# Altium footprint library SOP.PcbLib: 8 footprints
Each footprint in its own frame and in the unit in brackets; x right, y up, seen from the top. Pads: shape width x height; smd on the part's side, far side on the other; paste and mask are expansions set on the pad; w line width, h text height; cw(c..) or ccw(c..) is an arc to the next point about the centre after c.
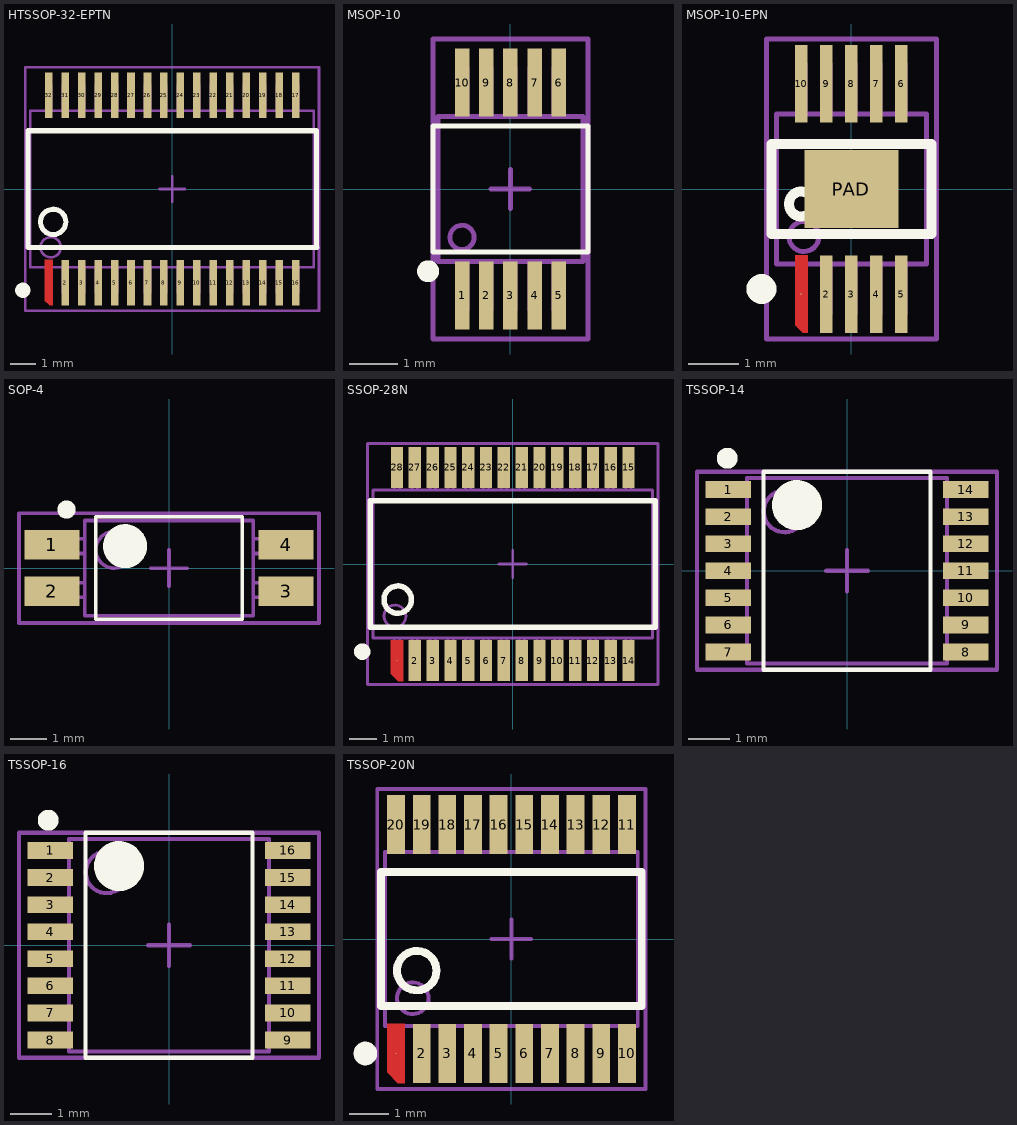
[diagram p0: the footprints below, top view; thin cyan lines are the x and y axes]

## HTSSOP-32-EPTN [mm]
height 1.2
pads (32):
  round 0.025 smd: 1(-4.875,-3.7)
  rect 0.3x1.8 smd: 2(-4.225,-3.7) 3(-3.575,-3.7) 4(-2.925,-3.7) 5(-2.275,-3.7) 6(-1.625,-3.7) 7(-0.975,-3.7) 8(-0.325,-3.7) 9(0.325,-3.7) 10(0.975,-3.7) 11(1.625,-3.7) 12(2.275,-3.7) 13(2.925,-3.7) 14(3.575,-3.7) 15(4.225,-3.7) 16(4.875,-3.7) 17(4.875,3.7) 18(4.225,3.7) 19(3.575,3.7) 20(2.925,3.7) 21(2.275,3.7) 22(1.625,3.7) 23(0.975,3.7) 24(0.325,3.7) 25(-0.325,3.7) 26(-0.975,3.7) 27(-1.625,3.7) 28(-2.275,3.7) 29(-2.925,3.7) 30(-3.575,3.7) 31(-4.225,3.7) 32(-4.875,3.7)
Top Layer:
  region: -5.025,-2.8 -4.725,-2.8 -4.725,-4.6 -4.845,-4.6 -5.025,-4.42
Top Overlay:
  circle w0.3: c-5.9,-4 r0.15
  circle w0.2: c-4.7,-1.3 r0.5
  lines w0.2: -5.7,-2.3 -5.7,2.3 5.7,2.3 5.7,-2.3 ; -5.689,-2.318 5.711,-2.318
Top Package:
  circle w0.1: c-4.8,-2.3 r0.4
  lines w0.1: -4.975,-3.1 -4.975,-4.1 -4.775,-4.1 -4.775,-3.1 ; -4.975,3.1 -4.975,4.1 -4.775,4.1 -4.775,3.1 ; -4.325,-3.1 -4.325,-4.1 -4.125,-4.1 -4.125,-3.1 ; -4.325,3.1 -4.325,4.1 -4.125,4.1 -4.125,3.1 ; -3.675,-3.1 -3.675,-4.1 -3.475,-4.1 -3.475,-3.1 ; -3.675,3.1 -3.675,4.1 -3.475,4.1 -3.475,3.1 ; -3.025,-3.1 -3.025,-4.1 -2.825,-4.1 -2.825,-3.1 ; -3.025,3.1 -3.025,4.1 -2.825,4.1 -2.825,3.1 ; -2.375,-3.1 -2.375,-4.1 -2.175,-4.1 -2.175,-3.1 ; -2.375,3.1 -2.375,4.1 -2.175,4.1 -2.175,3.1 ; -1.725,-3.1 -1.725,-4.1 -1.525,-4.1 -1.525,-3.1 ; -1.725,3.1 -1.725,4.1 -1.525,4.1 -1.525,3.1 ; -1.075,-3.1 -1.075,-4.1 -0.875,-4.1 -0.875,-3.1 ; -1.075,3.1 -1.075,4.1 -0.875,4.1 -0.875,3.1 ; -0.425,-3.1 -0.425,-4.1 -0.225,-4.1 -0.225,-3.1 ; -0.425,3.1 -0.425,4.1 -0.225,4.1 -0.225,3.1 ; 0.225,-3.1 0.225,-4.1 0.425,-4.1 0.425,-3.1 ; 0.225,3.1 0.225,4.1 0.425,4.1 0.425,3.1 ; 0.875,-3.1 0.875,-4.1 1.075,-4.1 1.075,-3.1 ; 0.875,3.1 0.875,4.1 1.075,4.1 1.075,3.1 ; 1.525,-3.1 1.525,-4.1 1.725,-4.1 1.725,-3.1 ; 1.525,3.1 1.525,4.1 1.725,4.1 1.725,3.1 ; 2.175,-3.1 2.175,-4.1 2.375,-4.1 2.375,-3.1 ; 2.175,3.1 2.175,4.1 2.375,4.1 2.375,3.1 ; 2.825,-3.1 2.825,-4.1 3.025,-4.1 3.025,-3.1 ; 2.825,3.1 2.825,4.1 3.025,4.1 3.025,3.1 ; 3.475,-3.1 3.475,-4.1 3.675,-4.1 3.675,-3.1 ; 3.475,3.1 3.475,4.1 3.675,4.1 3.675,3.1 ; 4.125,-3.1 4.125,-4.1 4.325,-4.1 4.325,-3.1 ; 4.125,3.1 4.125,4.1 4.325,4.1 4.325,3.1 ; 4.775,-3.1 4.775,-4.1 4.975,-4.1 4.975,-3.1 ; 4.775,3.1 4.775,4.1 4.975,4.1 4.975,3.1 ; -5.6,-3.1 5.6,-3.1 5.6,3.1 -5.6,3.1 -5.6,-3.1
Top Comment:
  text ".Comment" at -2.128,-0.503 h1.5
Top Designator:
  text ".Designator" at -3.438,-0.481 h2
Top Border:
  lines w0.1: -0.5,0 0.5,0 ; 0,-0.5 0,0.5 ; -5.8,-4.8 -5.8,4.8 5.8,4.8 5.8,-4.8 -5.8,-4.8
3D body "HTSSOP-TP-32N.step": height 1.21, standoff 0, extent -5.55,-4.225 5.55,4.075

## MSOP-10 [mm]
height 1.1
pads (10):
  rect 0.3x1.4 smd: 1(-1,-2.2) 2(-0.5,-2.2) 3(0,-2.2) 4(0.5,-2.2) 5(1,-2.2) 6(1,2.2) 7(0.5,2.2) 8(0,2.2) 9(-0.5,2.2) 10(-1,2.2)
Top Overlay:
  circle w0.254: c-1.7,-1.7 r0.1
  lines w0.1: -1.6,-1.3 1.6,-1.3 1.6,1.3 -1.6,1.3 -1.6,-1.3
Top Package:
  circle w0.1: c-1,-1 r0.25
  lines w0.1: -1.1,-2 -0.9,-2 ; -1.1,-1.5 -1.1,-2.5 -0.9,-2.5 -0.9,-1.5 ; -1.1,1.5 -1.1,2.5 -0.9,2.5 -0.9,1.5 ; -1.1,2 -0.9,2 ; -0.6,-2 -0.4,-2 ; -0.6,-1.5 -0.6,-2.5 -0.4,-2.5 -0.4,-1.5 ; -0.6,1.5 -0.6,2.5 -0.4,2.5 -0.4,1.5 ; -0.6,2 -0.4,2 ; -0.1,-2 0.1,-2 ; -0.1,-1.5 -0.1,-2.5 0.1,-2.5 0.1,-1.5 ; -0.1,1.5 -0.1,2.5 0.1,2.5 0.1,1.5 ; -0.1,2 0.1,2 ; 0.4,-2 0.6,-2 ; 0.4,-1.5 0.4,-2.5 0.6,-2.5 0.6,-1.5 ; 0.4,1.5 0.4,2.5 0.6,2.5 0.6,1.5 ; 0.4,2 0.6,2 ; 0.9,-2 1.1,-2 ; 0.9,-1.5 0.9,-2.5 1.1,-2.5 1.1,-1.5 ; 0.9,1.5 0.9,2.5 1.1,2.5 1.1,1.5 ; 0.9,2 1.1,2 ; -1.5,-1.5 1.5,-1.5 1.5,1.5 -1.5,1.5 -1.5,-1.5
Top Border:
  lines w0.1: -0.4,0 0.4,0 ; 0,-0.4 0,0.4 ; -1.6,-3.1 -1.6,3.1 1.6,3.1 1.6,-3.1 -1.6,-3.1
3D body "MSOP-10.step": height 1.05, standoff 0, extent -1.5,-2.514 1.5,2.514

## MSOP-10-EPN [mm]
height 1.1
pads (11):
  round 0.025 smd: 1(-1,-2.1)
  rect 0.25x1.55 smd: 2(-0.5,-2.1) 3(0,-2.1) 4(0.5,-2.1) 5(1,-2.1) 6(1,2.1) 7(0.5,2.1) 8(0,2.1) 9(-0.5,2.1) 10(-1,2.1)
  rect 1.88x1.57 smd: PAD(0,0)
Top Layer:
  region: -1.125,-1.325 -0.875,-1.325 -0.875,-2.875 -0.975,-2.875 -1.125,-2.725
Top Overlay:
  circle w0.3: c-1.8,-2 r0.15
  circle w0.2: c-1,-0.3 r0.25
  lines w0.2: -1.6,-0.9 -1.6,0.9 1.6,0.9 1.6,-0.9 -1.6,-0.9
Top Package:
  circle w0.1: c-0.95,-0.95 r0.3
  lines w0.1: -1.075,-1.5 -1.075,-2.5 -0.925,-2.5 -0.925,-1.5 ; -1.075,1.5 -1.075,2.5 -0.925,2.5 -0.925,1.5 ; -0.575,-1.5 -0.575,-2.5 -0.425,-2.5 -0.425,-1.5 ; -0.575,1.5 -0.575,2.5 -0.425,2.5 -0.425,1.5 ; -0.075,-1.5 -0.075,-2.5 0.075,-2.5 0.075,-1.5 ; -0.075,1.5 -0.075,2.5 0.075,2.5 0.075,1.5 ; 0.425,-1.5 0.425,-2.5 0.575,-2.5 0.575,-1.5 ; 0.425,1.5 0.425,2.5 0.575,2.5 0.575,1.5 ; 0.925,-1.5 0.925,-2.5 1.075,-2.5 1.075,-1.5 ; 0.925,1.5 0.925,2.5 1.075,2.5 1.075,1.5 ; -1.5,-1.5 -1.5,1.5 1.5,1.5 1.5,-1.5 -1.5,-1.5
Top Comment:
  text ".Comment" at -2.128,-0.474 h1.5
Top Designator:
  text ".Designator" at -3.438,-0.451 h2
Top Border:
  lines w0.1: -0.5,0 0.5,0 ; 0,-0.5 0,0.5 ; -1.7,-3 -1.7,3 1.7,3 1.7,-3 -1.7,-3
3D body "MSOP-10.STEP": height 1.25, standoff 0, extent -1.5,-2.45 1.5,2.45

## SOP-4 [mm]
height 15
pads (4):
  rect 1.5x0.8 smd: 1(-3.2,0.635) 2(-3.2,-0.635) 3(3.2,-0.635) 4(3.2,0.635)
Top Overlay:
  circle w0.25: c-2.8,1.6 r0.125
  circle w0.6: c-1.2,0.6 r0.3
  lines w0.1: -2,-1.4 -2,1.4 2,1.4 2,-1.4 -2,-1.4
Top Package:
  circle w0.1: c-1.5,0.5 r0.5
  lines w0.1: -2.3,-0.8 -3.3,-0.8 -3.3,-0.4 -2.3,-0.4 ; -2.3,0.4 -3.3,0.4 -3.3,0.8 -2.3,0.8 ; 2.3,-0.8 3.3,-0.8 3.3,-0.4 2.3,-0.4 ; 2.3,0.4 3.3,0.4 3.3,0.8 2.3,0.8 ; -2.3,-1.3 2.3,-1.3 2.3,1.3 -2.3,1.3 -2.3,-1.3
Top Comment:
  text ".Comment" at -1.702,-0.391 h1.2
Top Designator:
  text ".Designator" at -2.579,-0.349 h1.5
Top Border:
  lines w0.1: -0.5,0 0.5,0 ; 0,-0.5 0,0.5 ; -4.1,-1.5 4.1,-1.5 4.1,1.5 -4.1,1.5 -4.1,-1.5
3D body "SOP-4.stp": height 2.15, standoff 0.03, extent -3.5,-1.3 3.5,1.3

## SSOP-28N [mm]
height 2
pads (28):
  round 0.025 smd: 1(-4.225,-3.525)
  rect 0.45x1.5 smd: 2(-3.575,-3.525) 3(-2.925,-3.525) 4(-2.275,-3.525) 5(-1.625,-3.525) 6(-0.975,-3.525) 7(-0.325,-3.525) 8(0.325,-3.525) 9(0.975,-3.525) 10(1.625,-3.525) 11(2.275,-3.525) 12(2.925,-3.525) 13(3.575,-3.525) 14(4.225,-3.525) 15(4.225,3.525) 16(3.575,3.525) 17(2.925,3.525) 18(2.275,3.525) 19(1.625,3.525) 20(0.975,3.525) 21(0.325,3.525) 22(-0.325,3.525) 23(-0.975,3.525) 24(-1.625,3.525) 25(-2.275,3.525) 26(-2.925,3.525) 27(-3.575,3.525) 28(-4.225,3.525)
Top Layer:
  region: -4.45,-2.775 -4,-2.775 -4,-4.275 -4.18,-4.275 -4.45,-4.005
Top Overlay:
  circle w0.3: c-5.5,-3.2 r0.15
  circle w0.2: c-4.2,-1.3 r0.5
  lines w0.2: -5.2,-2.3 5.2,-2.3 5.2,2.3 -5.2,2.3 -5.2,-2.3
Top Package:
  circle w0.1: c-4.3,-1.9 r0.4
  lines w0.1: -4.325,-2.7 -4.325,-3.9 -4.125,-3.9 -4.125,-2.7 ; -4.325,2.7 -4.325,3.9 -4.125,3.9 -4.125,2.7 ; -3.675,-2.7 -3.675,-3.9 -3.475,-3.9 -3.475,-2.7 ; -3.675,2.7 -3.675,3.9 -3.475,3.9 -3.475,2.7 ; -3.025,-2.7 -3.025,-3.9 -2.825,-3.9 -2.825,-2.7 ; -3.025,2.7 -3.025,3.9 -2.825,3.9 -2.825,2.7 ; -2.375,-2.7 -2.375,-3.9 -2.175,-3.9 -2.175,-2.7 ; -2.375,2.7 -2.375,3.9 -2.175,3.9 -2.175,2.7 ; -1.725,-2.7 -1.725,-3.9 -1.525,-3.9 -1.525,-2.7 ; -1.725,2.7 -1.725,3.9 -1.525,3.9 -1.525,2.7 ; -1.075,-2.7 -1.075,-3.9 -0.875,-3.9 -0.875,-2.7 ; -0.425,-2.7 -0.425,-3.9 -0.225,-3.9 -0.225,-2.7 ; -0.425,2.7 -0.425,3.9 -0.225,3.9 -0.225,2.7 ; 0.225,-2.7 0.225,-3.9 0.425,-3.9 0.425,-2.7 ; 0.225,2.7 0.225,3.9 0.425,3.9 0.425,2.7 ; 0.875,-2.7 0.875,-3.9 1.075,-3.9 1.075,-2.7 ; 0.875,2.7 0.875,3.9 1.075,3.9 1.075,2.7 ; 1.525,-2.7 1.525,-3.9 1.725,-3.9 1.725,-2.7 ; 1.525,2.7 1.525,3.9 1.725,3.9 1.725,2.7 ; 2.175,-2.7 2.175,-3.9 2.375,-3.9 2.375,-2.7 ; 2.175,2.7 2.175,3.9 2.375,3.9 2.375,2.7 ; 2.825,-2.7 2.825,-3.9 3.025,-3.9 3.025,-2.7 ; 2.825,2.7 2.825,3.9 3.025,3.9 3.025,2.7 ; 3.475,-2.7 3.475,-3.9 3.675,-3.9 3.675,-2.7 ; 3.475,2.7 3.475,3.9 3.675,3.9 3.675,2.7 ; 4.125,-2.7 4.125,-3.9 4.325,-3.9 4.325,-2.7 ; 4.125,2.7 4.125,3.9 4.325,3.9 4.325,2.7 ; -1.075,3.9 -1.075,2.7 -1.075,3.9 ; -1.075,3.9 -0.875,3.9 ; -1.075,3.9 -0.875,3.9 ; -0.875,3.9 -0.875,2.7 -0.875,3.9 ; -5.1,-2.7 -5.1,2.7 5.1,2.7 5.1,-2.7 -5.1,-2.7
Top Comment:
  text ".Comment" at -2.128,-0.503 h1.5
Top Designator:
  text ".Designator" at -3.438,-0.481 h2
Top Border:
  lines w0.1: -0.5,0 0.5,0 ; 0,-0.5 0,0.5 ; -5.3,-4.4 5.3,-4.4 5.3,4.4 -5.3,4.4 -5.3,-4.4
3D body "SSOP-28.STEP": height 1.9, standoff 0, extent -5.1,-3.9 5.1,3.9

## TSSOP-14 [mm]
height 1.1
pads (14):
  rect 1.1x0.4 smd: 1(-2.85,1.95) 2(-2.85,1.3) 3(-2.85,0.65) 4(-2.85,0) 5(-2.85,-0.65) 6(-2.85,-1.3) 7(-2.85,-1.95) 8(2.85,-1.95) 9(2.85,-1.3) 10(2.85,-0.65) 11(2.85,0) 12(2.85,0.65) 13(2.85,1.3) 14(2.85,1.95)
Top Overlay:
  circle w0.25: c-2.875,2.7 r0.125
  circle w0.6: c-1.2,1.575 r0.3
  lines w0.1: -2,-2.375 -2,2.375 2,2.375 2,-2.375 -2,-2.375
Top Package:
  circle w0.1: c-1.5,1.425 r0.5
  lines w0.1: -2.4,-2.05 -3.2,-2.05 -3.2,-1.85 -2.4,-1.85 ; -2.4,-1.4 -3.2,-1.4 -3.2,-1.2 -2.4,-1.2 ; -2.4,-0.75 -3.2,-0.75 -3.2,-0.55 -2.4,-0.55 ; -2.4,-0.1 -3.2,-0.1 -3.2,0.1 -2.4,0.1 ; -2.4,0.55 -3.2,0.55 -3.2,0.75 -2.4,0.75 ; -2.4,1.2 -3.2,1.2 -3.2,1.4 -2.4,1.4 ; -2.4,1.85 -3.2,1.85 -3.2,2.05 -2.4,2.05 ; 2.4,-2.05 3.2,-2.05 3.2,-1.85 2.4,-1.85 ; 2.4,-1.4 3.2,-1.4 3.2,-1.2 2.4,-1.2 ; 2.4,-0.75 3.2,-0.75 3.2,-0.55 2.4,-0.55 ; 2.4,-0.1 3.2,-0.1 3.2,0.1 2.4,0.1 ; 2.4,0.55 3.2,0.55 3.2,0.75 2.4,0.75 ; 2.4,1.2 3.2,1.2 3.2,1.4 2.4,1.4 ; 2.4,1.85 3.2,1.85 3.2,2.05 2.4,2.05 ; -2.4,-2.225 2.4,-2.225 2.4,2.225 -2.4,2.225 -2.4,-2.225
Top Border:
  lines w0.1: -0.5,0 0.5,0 ; 0,-0.5 0,0.5 ; -3.6,-2.375 3.6,-2.375 3.6,2.375 -3.6,2.375 -3.6,-2.375
3D body "TSSOP-14.STEP": height 1.2, standoff 0, extent -3.2,-2.5 3.2,2.5

## TSSOP-16 [mm]
height 1.1
pads (16):
  rect 1.1x0.4 smd: 1(-2.85,2.275) 2(-2.85,1.625) 3(-2.85,0.975) 4(-2.85,0.325) 5(-2.85,-0.325) 6(-2.85,-0.975) 7(-2.85,-1.625) 8(-2.85,-2.275) 9(2.85,-2.275) 10(2.85,-1.625) 11(2.85,-0.975) 12(2.85,-0.325) 13(2.85,0.325) 14(2.85,0.975) 15(2.85,1.625) 16(2.85,2.275)
Top Overlay:
  circle w0.25: c-2.9,3 r0.125
  circle w0.6: c-1.2,1.9 r0.3
  lines w0.1: -2,-2.7 -2,2.7 2,2.7 2,-2.7 -2,-2.7
Top Package:
  circle w0.1: c-1.5,1.75 r0.5
  lines w0.1: -2.4,-2.375 -3.2,-2.375 -3.2,-2.175 -2.4,-2.175 ; -2.4,-1.725 -3.2,-1.725 -3.2,-1.525 -2.4,-1.525 ; -2.4,-1.075 -3.2,-1.075 -3.2,-0.875 -2.4,-0.875 ; -2.4,-0.425 -3.2,-0.425 -3.2,-0.225 -2.4,-0.225 ; -2.4,0.225 -3.2,0.225 -3.2,0.425 -2.4,0.425 ; -2.4,0.875 -3.2,0.875 -3.2,1.075 -2.4,1.075 ; -2.4,1.525 -3.2,1.525 -3.2,1.725 -2.4,1.725 ; -2.4,2.175 -3.2,2.175 -3.2,2.375 -2.4,2.375 ; 2.4,-2.375 3.2,-2.375 3.2,-2.175 2.4,-2.175 ; 2.4,-1.725 3.2,-1.725 3.2,-1.525 2.4,-1.525 ; 2.4,-1.075 3.2,-1.075 3.2,-0.875 2.4,-0.875 ; 2.4,-0.425 3.2,-0.425 3.2,-0.225 2.4,-0.225 ; 2.4,0.225 3.2,0.225 3.2,0.425 2.4,0.425 ; 2.4,0.875 3.2,0.875 3.2,1.075 2.4,1.075 ; 2.4,1.525 3.2,1.525 3.2,1.725 2.4,1.725 ; 2.4,2.175 3.2,2.175 3.2,2.375 2.4,2.375 ; -2.4,-2.55 2.4,-2.55 2.4,2.55 -2.4,2.55 -2.4,-2.55
Top Border:
  lines w0.1: -0.5,0 0.5,0 ; 0,-0.5 0,0.5 ; -3.6,-2.7 3.6,-2.7 3.6,2.7 -3.6,2.7 -3.6,-2.7
3D body "TSSOP-16.STEP": height 1.2, standoff 0, extent -3.2,-2.5 3.2,2.5

## TSSOP-20N [mm]
height 1.2
pads (20):
  round 0.025 smd: 1(-2.925,-2.9)
  rect 0.45x1.5 smd: 2(-2.275,-2.9) 3(-1.625,-2.9) 4(-0.975,-2.9) 5(-0.325,-2.9) 6(0.325,-2.9) 7(0.975,-2.9) 8(1.625,-2.9) 9(2.275,-2.9) 10(2.925,-2.9) 11(2.925,2.9) 12(2.275,2.9) 13(1.625,2.9) 14(0.975,2.9) 15(0.325,2.9) 16(-0.325,2.9) 17(-0.975,2.9) 18(-1.625,2.9) 19(-2.275,2.9) 20(-2.925,2.9)
Top Layer:
  region: -3.15,-2.15 -2.7,-2.15 -2.7,-3.65 -2.88,-3.65 -3.15,-3.38
Top Overlay:
  circle w0.2: c-2.4,-0.8 r0.5
  circle w0.3: c-3.7,-2.9 r0.15
  lines w0.2: -3.3,-1.7 -3.3,1.7 3.3,1.7 3.3,-1.7 -3.3,-1.7
Top Package:
  circle w0.1: c-2.5,-1.5 r0.4
  lines w0.1: -3.025,-2.2 -3.025,-3.2 -2.825,-3.2 -2.825,-2.2 ; -3.025,2.2 -3.025,3.2 -2.825,3.2 -2.825,2.2 ; -2.375,-2.2 -2.375,-3.2 -2.175,-3.2 -2.175,-2.2 ; -2.375,2.2 -2.375,3.2 -2.175,3.2 -2.175,2.2 ; -1.725,-2.2 -1.725,-3.2 -1.525,-3.2 -1.525,-2.2 ; -1.725,2.2 -1.725,3.2 -1.525,3.2 -1.525,2.2 ; -1.075,-2.2 -1.075,-3.2 -0.875,-3.2 -0.875,-2.2 ; -1.075,2.2 -1.075,3.2 -0.875,3.2 -0.875,2.2 ; -0.425,-2.2 -0.425,-3.2 -0.225,-3.2 -0.225,-2.2 ; -0.425,2.2 -0.425,3.2 -0.225,3.2 -0.225,2.2 ; 0.225,-2.2 0.225,-3.2 0.425,-3.2 0.425,-2.2 ; 0.225,2.2 0.225,3.2 0.425,3.2 0.425,2.2 ; 0.875,-2.2 0.875,-3.2 1.075,-3.2 1.075,-2.2 ; 0.875,2.2 0.875,3.2 1.075,3.2 1.075,2.2 ; 1.525,-2.2 1.525,-3.2 1.725,-3.2 1.725,-2.2 ; 1.525,2.2 1.525,3.2 1.725,3.2 1.725,2.2 ; 2.175,-2.2 2.175,-3.2 2.375,-3.2 2.375,-2.2 ; 2.175,2.2 2.175,3.2 2.375,3.2 2.375,2.2 ; 2.825,-2.2 2.825,-3.2 3.025,-3.2 3.025,-2.2 ; 2.825,2.2 2.825,3.2 3.025,3.2 3.025,2.2 ; -3.2,-2.2 -3.2,2.2 3.2,2.2 3.2,-2.2 -3.2,-2.2
Top Comment:
  text ".Comment" at -2.128,-0.503 h1.5
Top Designator:
  text ".Designator" at -3.438,-0.481 h2
Top Border:
  lines w0.1: -0.5,0 0.5,0 ; 0,-0.5 0,0.5 ; -3.4,-3.8 -3.4,3.8 3.4,3.8 3.4,-3.8 -3.4,-3.8
3D body "TSSOP-20.STEP": height 1.2, standoff 0, extent -3.25,-3.2 3.25,3.2